# Altium footprint library 固定柱.PcbLib: 140 footprints (part 8 of 9)
Each footprint in its own frame and in the unit in brackets; x right, y up, seen from the top. Pads: shape width x height; smd on the part's side, far side on the other; paste and mask are expansions set on the pad; w line width, h text height; cw(c..) or ccw(c..) is an arc to the next point about the centre after c.
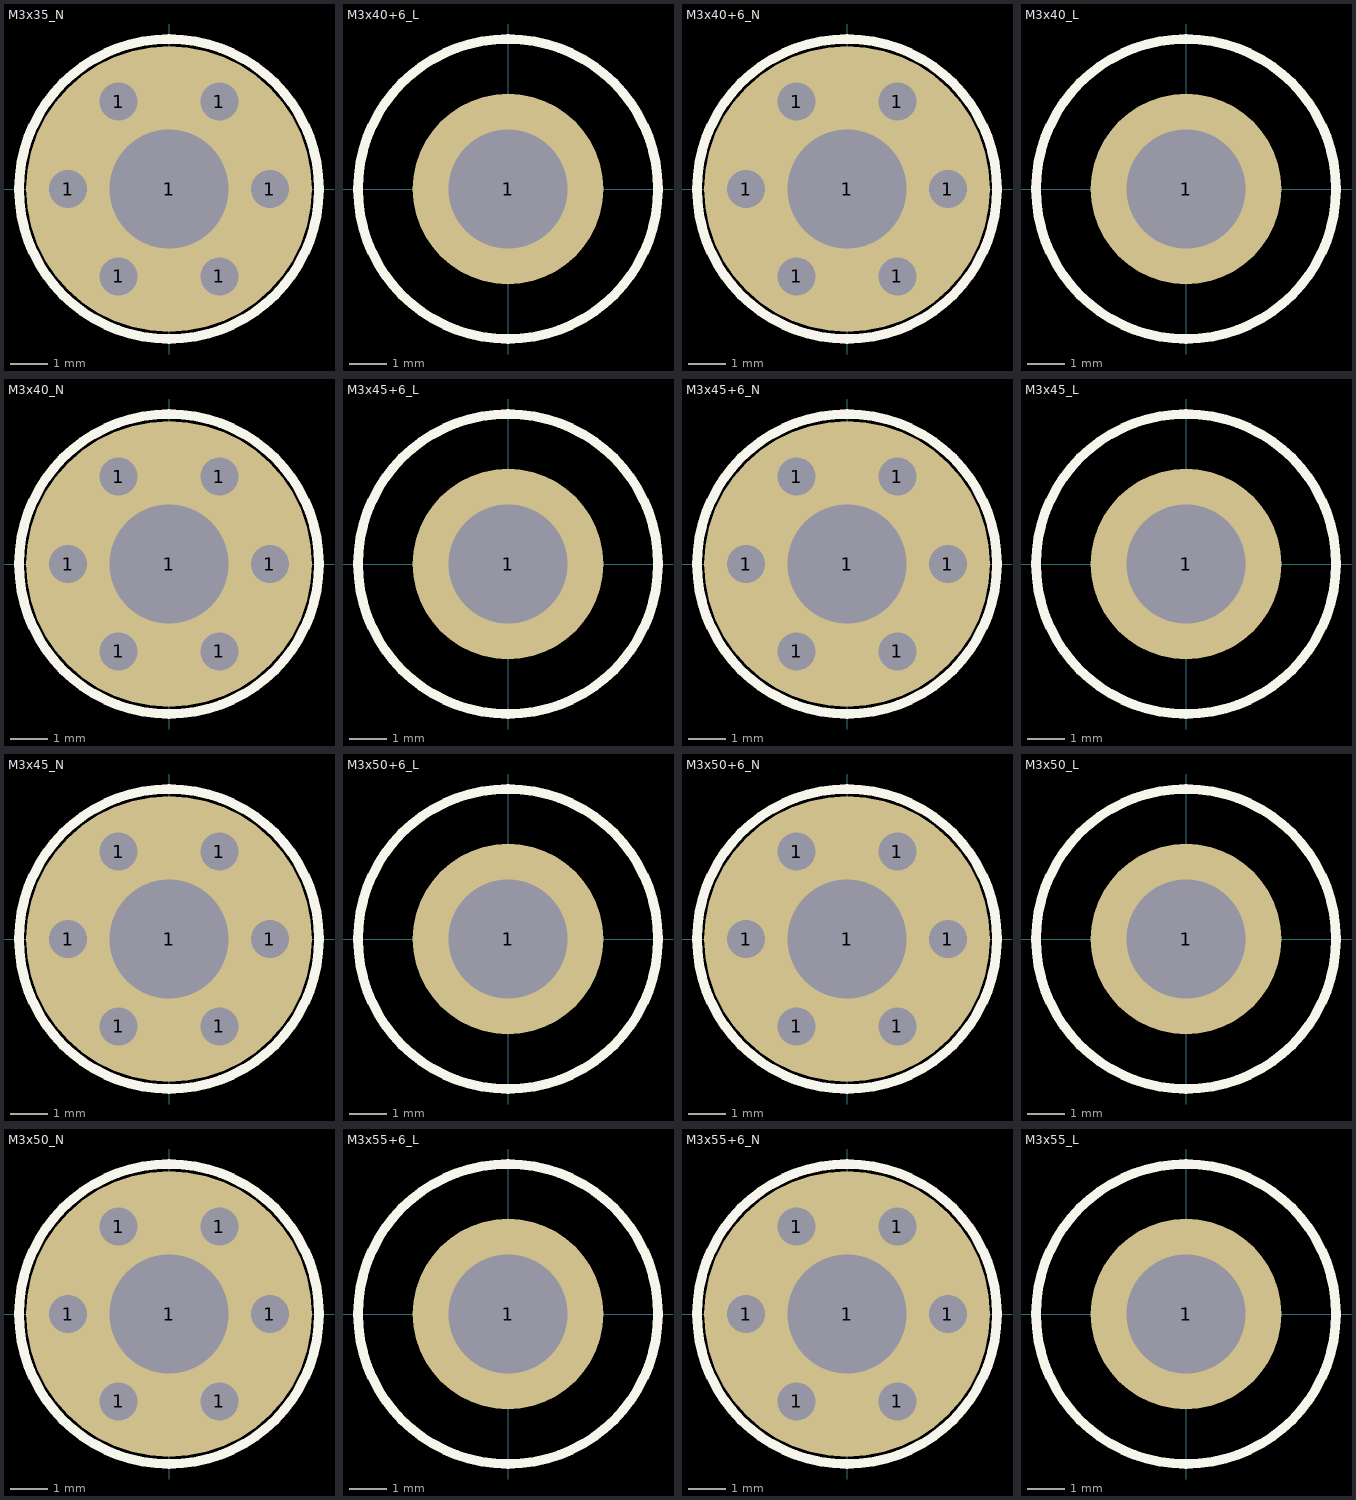
[diagram p7: the footprints below, top view; thin cyan lines are the x and y axes]

## M3x35_N [mil] "M3铜柱，长：35mm"
pads (7):
  round 40 hole 40: 1(-106,0) 1(-53,-91.8) 1(-53,91.8) 1(53,-91.8) 1(53,91.8) 1(106,0)
  round 300 hole 125: 1(0,0)
Top Overlay:
  circle w10: c0,0 r157.48
3D body "M3x35.STEP": height 1379.93, standoff 1.96, extent -106.22,-92.52 106.22,92.52

## M3x40+6_L [mil] "M3铜柱，长：40mm，螺纹长：6mm"
pads (1):
  round 200 hole 125: 1(0,0)
Top Overlay:
  circle w10: c0,0 r157.48
3D body "M3x40+6.STEP": height 1576.78, standoff -234.25, extent -106.22,-92.52 106.22,92.52

## M3x40+6_N [mil] "M3铜柱，长：40mm，螺纹长：6mm"
pads (7):
  round 40 hole 40: 1(-106,0) 1(-53,-91.8) 1(-53,91.8) 1(53,-91.8) 1(53,91.8) 1(106,0)
  round 300 hole 125: 1(0,0)
Top Overlay:
  circle w10: c0,0 r157.48
3D body "M3x40+6.STEP": height 1576.78, standoff -234.25, extent -106.22,-92.52 106.22,92.52

## M3x40_L [mil] "M3铜柱，长：40mm"
pads (1):
  round 200 hole 125: 1(0,0)
Top Overlay:
  circle w10: c0,0 r157.48
3D body "M3x40.STEP": height 1576.8, standoff 1.94, extent -106.22,-92.52 106.22,92.52

## M3x40_N [mil] "M3铜柱，长：40mm"
pads (7):
  round 40 hole 40: 1(-106,0) 1(-53,-91.8) 1(-53,91.8) 1(53,-91.8) 1(53,91.8) 1(106,0)
  round 300 hole 125: 1(0,0)
Top Overlay:
  circle w10: c0,0 r157.48
3D body "M3x40.STEP": height 1576.8, standoff 1.94, extent -106.22,-92.52 106.22,92.52

## M3x45+6_L [mil] "M3铜柱，长：45mm，螺纹长：6mm"
pads (1):
  round 200 hole 125: 1(0,0)
Top Overlay:
  circle w10: c0,0 r157.48
3D body "M3x45+6.STEP": height 1773.64, standoff -234.25, extent -106.22,-92.52 106.22,92.52

## M3x45+6_N [mil] "M3铜柱，长：45mm，螺纹长：6mm"
pads (7):
  round 40 hole 40: 1(-106,0) 1(-53,-91.8) 1(-53,91.8) 1(53,-91.8) 1(53,91.8) 1(106,0)
  round 300 hole 125: 1(0,0)
Top Overlay:
  circle w10: c0,0 r157.48
3D body "M3x45+6.STEP": height 1773.64, standoff -234.25, extent -106.22,-92.52 106.22,92.52

## M3x45_L [mil] "M3铜柱，长：45mm"
pads (1):
  round 200 hole 125: 1(0,0)
Top Overlay:
  circle w10: c0,0 r157.48
3D body "M3x45.STEP": height 1773.63, standoff 1.96, extent -106.22,-92.52 106.22,92.52

## M3x45_N [mil] "M3铜柱，长：45mm"
pads (7):
  round 40 hole 40: 1(-106,0) 1(-53,-91.8) 1(-53,91.8) 1(53,-91.8) 1(53,91.8) 1(106,0)
  round 300 hole 125: 1(0,0)
Top Overlay:
  circle w10: c0,0 r157.48
3D body "M3x45.STEP": height 1773.63, standoff 1.96, extent -106.22,-92.52 106.22,92.52

## M3x50+6_L [mil] "M3铜柱，长：50mm，螺纹长：6mm"
pads (1):
  round 200 hole 125: 1(0,0)
Top Overlay:
  circle w10: c0,0 r157.48
3D body "M3x50+6.STEP": height 1970.48, standoff -234.25, extent -106.22,-92.52 106.22,92.52

## M3x50+6_N [mil] "M3铜柱，长：50mm，螺纹长：6mm"
pads (7):
  round 40 hole 40: 1(-106,0) 1(-53,-91.8) 1(-53,91.8) 1(53,-91.8) 1(53,91.8) 1(106,0)
  round 300 hole 125: 1(0,0)
Top Overlay:
  circle w10: c0,0 r157.48
3D body "M3x50+6.STEP": height 1970.48, standoff -234.25, extent -106.22,-92.52 106.22,92.52

## M3x50_L [mil] "M3铜柱，长：50mm"
pads (1):
  round 200 hole 125: 1(0,0)
Top Overlay:
  circle w10: c0,0 r157.48
3D body "M3x50.STEP": height 1970.5, standoff 1.94, extent -106.22,-92.52 106.22,92.52

## M3x50_N [mil] "M3铜柱，长：50mm"
pads (7):
  round 40 hole 40: 1(-106,0) 1(-53,-91.8) 1(-53,91.8) 1(53,-91.8) 1(53,91.8) 1(106,0)
  round 300 hole 125: 1(0,0)
Top Overlay:
  circle w10: c0,0 r157.48
3D body "M3x50.STEP": height 1970.5, standoff 1.94, extent -106.22,-92.52 106.22,92.52

## M3x55+6_L [mil] "M3铜柱，长：55mm，螺纹长：6mm"
pads (1):
  round 200 hole 125: 1(0,0)
Top Overlay:
  circle w10: c0,0 r157.48
3D body "M3x55+6.STEP": height 2167.36, standoff -234.25, extent -106.22,-92.52 106.22,92.52

## M3x55+6_N [mil] "M3铜柱，长：55mm，螺纹长：6mm"
pads (7):
  round 40 hole 40: 1(-106,0) 1(-53,-91.8) 1(-53,91.8) 1(53,-91.8) 1(53,91.8) 1(106,0)
  round 300 hole 125: 1(0,0)
Top Overlay:
  circle w10: c0,0 r157.48
3D body "M3x55+6.STEP": height 2167.36, standoff -234.25, extent -106.22,-92.52 106.22,92.52

## M3x55_L [mil] "M3铜柱，长：55mm"
pads (1):
  round 200 hole 125: 1(0,0)
Top Overlay:
  circle w10: c0,0 r157.48
3D body "M3x55.STEP": height 2167.33, standoff 1.96, extent -106.22,-92.52 106.22,92.52